# Altium schematic symbol library SchLib.SchLib: 3 symbols
Pins are listed as number, name and electrical type; pins without a type are passive.

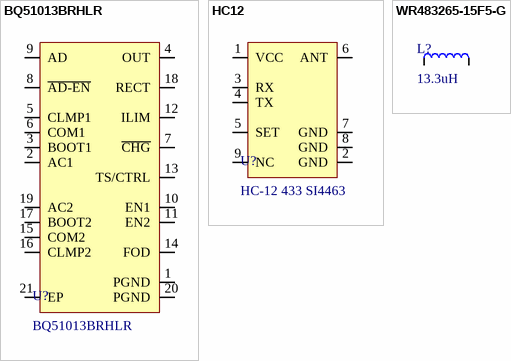
[diagram p0: symbols BQ51013BRHLR to WR483265-15F5-G]

## BQ51013BRHLR
designator U?
WPC 1.1 Compatible Fully integrated Wireless power Receiver IC 20-VQFN 0 to 125; Manufacturer: Texas Instruments; Output Voltage: 5V; Output Current: 1.5A; Item Type: Wireless Charge Controller; Supplier: Mouser; Supplier Part Number: 595-BQ51013BRHLR; Manufacturer Part Number: BQ51013BRHLR; RoHS: Yes; Category: Power Management ICs; Stock: 4754; Pricing: 1=3.34, 10=3, 50=3, 100=2.46, 1000=1.76, 10000=1.67 (USD); Mounting Technology: Surface Mount; Case/Package: VQFN; Pins: 20; Contact Plating: Gold; Min Operating Temperature: 0°C; Max Operating Temperature: 125°C; Packaging: Tape and Reel; Package Quantity: 3000; Series: -; Operating Supply Current: 1.5A; Logic Function: Receiver; Lead Free: Lead Free; RoHS Compliant: Yes; ComponentLink1URL: https://datasheet.ciiva.com/6601/bq51013b-6601292.pdf?src-supplier=Digikey; ComponentLink1Description: https://datasheet.ciiva.com/6601/bq51013b-6601292.pdf?src-supplier=Digikey; LCSC Part Number: C55663; Package: VQFN-20(4.5x3.5)
footprint IC_MSP430FR2522IRHLR
pins: 1 PGND, 2 AC1, 3 BOOT1, 4 OUT, 5 CLMP1, 6 COM1, 7 ~{CHG}, 8 ~{AD-EN}, 9 AD, 10 EN1, 11 EN2, 12 ILIM, 13 TS/CTRL, 14 FOD, 15 COM2, 16 CLMP2, 17 BOOT2, 18 RECT, 19 AC2, 20 PGND, 21 EP

## HC12
designator U?, comment HC-12 433 SI4463
Manufacturer: *; Manufacturer Part Number: *; Parameter 3: *; Item Type: *; Package: *
footprint HC-12 Module
pins: 1 VCC, 2 GND, 3 RX, 4 TX, 5 SET, 6 ANT, 7 GND, 8 GND, 9 NC

## WR483265-15F5-G
designator L?, comment 13.3uH
1 Coil, 1 Layer 13.3µH Wireless Charging Coil Receiver 200mOhm; Manufacturer: TDK Corporation; Manufacturer Part Number: WR483265-15F5-G; Digikey Part Number: 445-16090-ND; Item Type: Wireless Charging Coil; Package: -; ComponentLink1Description: Digikey; ComponentLink1URL: https://www.digikey.com/en/products/detail/tdk-corporation/WR483265-15F5-G/4702656?s=N4IgTCBcDaIOoCUAsAOAzGAbAVgLQEZsAxPAcRAF0BfIA
footprint Th Hole Test Point (3.7mm Drill 6mm pad)
pins: 1, 2